# Altium schematic symbol library LED.SchLib: 1 symbol
Pins are listed as number, name and electrical type; pins without a type are passive.

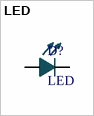
[diagram p0: symbol LED]

## LED
designator D?
CHIP LED RED; MP: LTW-C191TLA; Package: None; Availability: Unavailable; Value: *; Price: None
footprint LED0603 (LEDC1608X65N)
footprint LED1206 (LEDC3115X65N)
pins: A, C